# Altium footprint library Footprints.PcbLib: 320 footprints (part 16 of 20)
Each footprint in its own frame and in the unit in brackets; x right, y up, seen from the top. Pads: shape width x height; smd on the part's side, far side on the other; paste and mask are expansions set on the pad; w line width, h text height; cw(c..) or ccw(c..) is an arc to the next point about the centre after c.
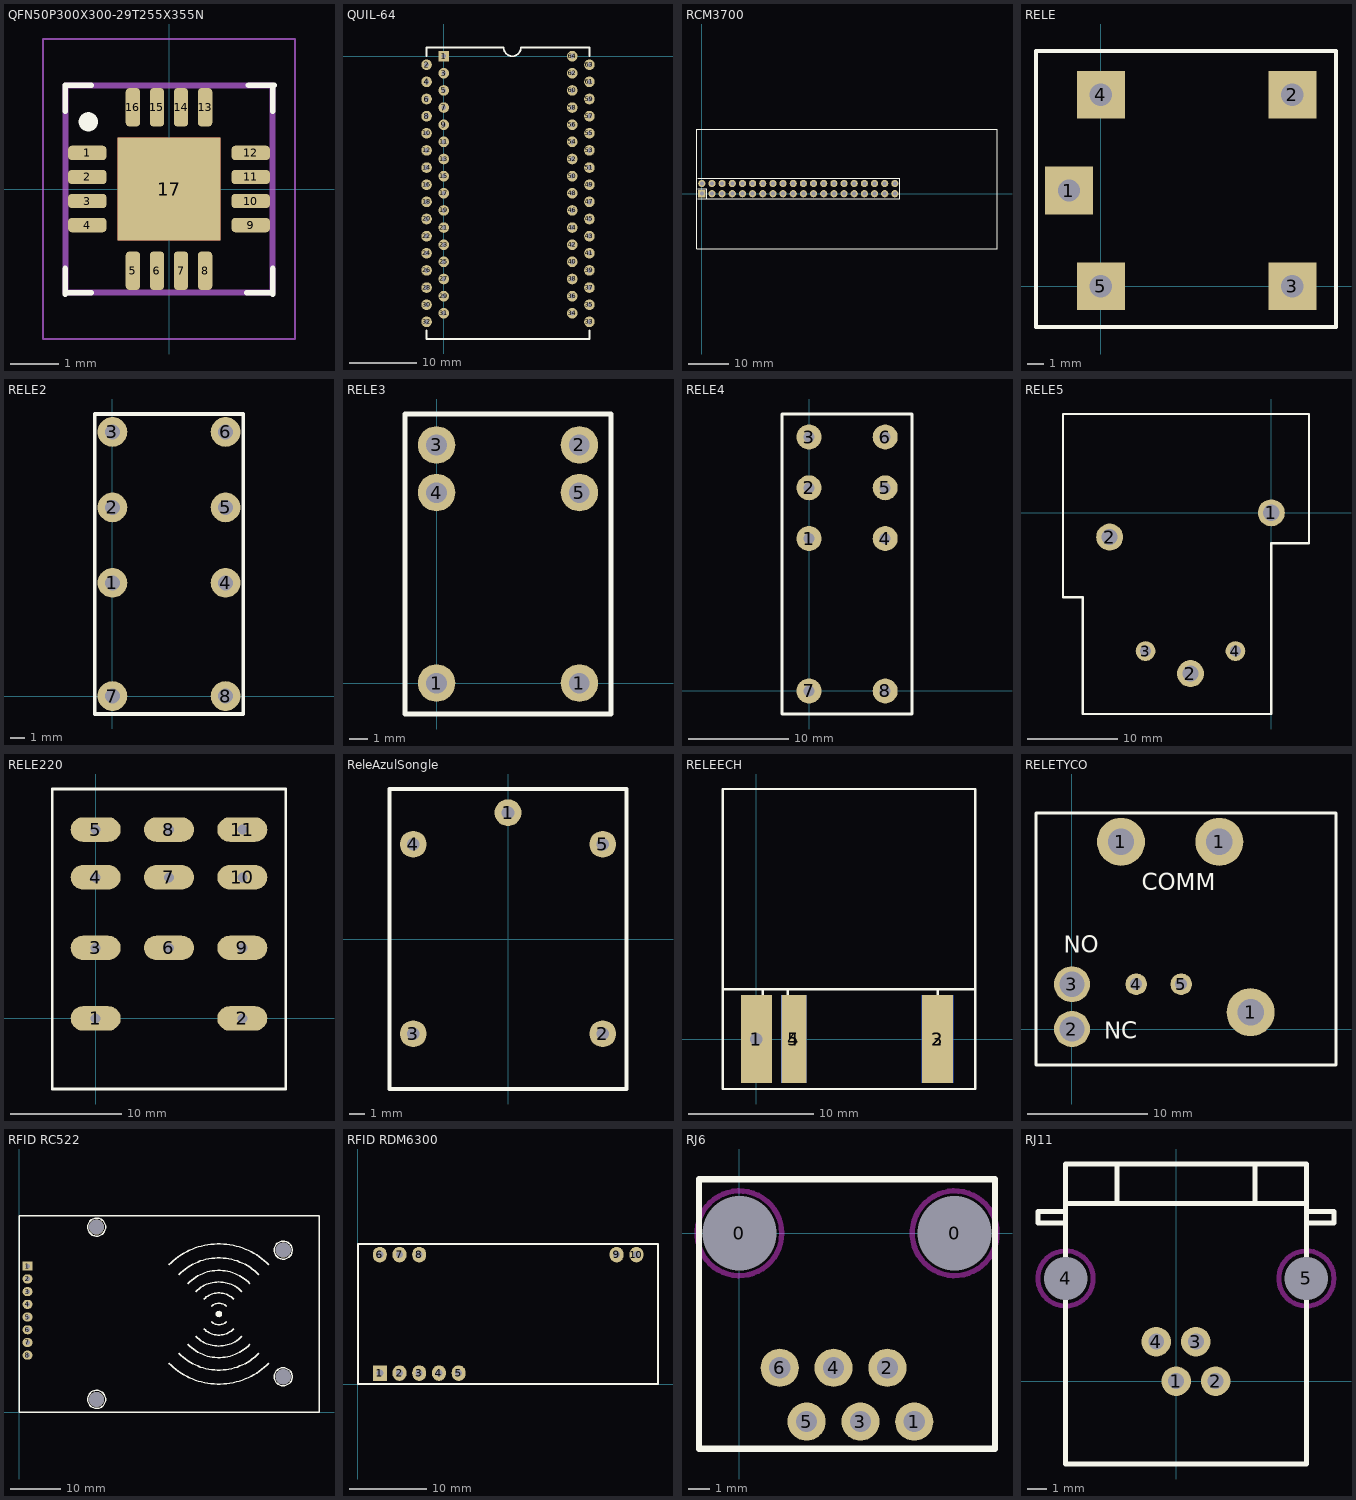
[diagram p15: the footprints below, top view; thin cyan lines are the x and y axes]

## QFN50P300X300-29T255X355N [mm] "Quad Flat No-Lead (QFN with Tab), 0.50 mm pitch;rect.,8 pin X 6 pin,5.00 mm L X 4.00 mm W X 0.80 mm H body"
height 0.8
pads (17):
  rrect52% 0.8x0.3 smd: 1(-1.7,0.75) 2(-1.7,0.25) 3(-1.7,-0.25) 4(-1.7,-0.75) 9(1.7,-0.75) 10(1.7,-0.25) 11(1.7,0.25) 12(1.7,0.75)
  rrect52% 0.3x0.8 smd: 5(-0.75,-1.7) 6(-0.25,-1.7) 7(0.25,-1.7) 8(0.75,-1.7) 13(0.75,1.7) 14(0.25,1.7) 15(-0.25,1.7) 16(-0.75,1.7)
  rect 2.14x2.14 smd paste-2.85 mask-2.85: 17(0,0)
Top Layer:
  region: 0,-1.07 -1.07,-1.07 -1.07,1.07 -0.925,1.07 1.07,1.07 1.07,-1.07
Top Overlay:
  circle w0.2: c-1.678,1.397 r0.1
  lines w0.12: -2.159,-2.191 -2.159,-1.651 ; -2.159,-2.159 -1.619,-2.159 ; -2.159,1.619 -2.159,2.159 -1.619,2.159 ; 1.619,-2.159 2.159,-2.159 ; 1.651,2.159 2.191,2.159 ; 2.159,-2.191 2.159,-1.651 ; 2.159,1.619 2.159,2.159
Top Solder:
  region: -1.07,-1.07 -1.07,1.07 1.07,-1.07 1.07,1.07
Mechanical 13:
  lines w0.12: -2.15,-2.15 2.15,-2.15 2.15,2.15 -2.15,2.15 -2.15,-2.15
Mechanical 15:
  circle w0.05: c0,0 r0.25
  lines w0.05: -0.35,0 0.35,0 ; 0,-0.35 0,0.35 ; -2.62,-3.12 2.62,-3.12 2.62,3.12 -2.62,3.12 -2.62,-3.12
3D body: height 0.8, standoff 0, extent -2.21,-2.21 2.21,2.21

## QUIL-64 [mil]
pads (64):
  rect 62x62 hole 28: 1(0,0)
  round 62 hole 28: 2(-100,-50) 3(0,-100) 4(-100,-150) 5(0,-200) 6(-100,-250) 7(0,-300) 8(-100,-350) 9(0,-400) 10(-100,-450) 11(0,-500) 12(-100,-550) 13(0,-600) 14(-100,-650) 15(0,-700) 16(-100,-750) 17(0,-800) 18(-100,-850) 19(0,-900) 20(-100,-950) 21(0,-1000) 22(-100,-1050) 23(0,-1100) 24(-100,-1150) 25(0,-1200) 26(-100,-1250) 27(0,-1300) 28(-100,-1350) 29(0,-1400) 30(-100,-1450) 31(0,-1500) 32(-100,-1550) 33(850,-1550) 34(750,-1500) 35(850,-1450) 36(750,-1400) 37(850,-1350) 38(750,-1300) 39(850,-1250) 40(750,-1200) 41(850,-1150) 42(750,-1100) 43(850,-1050) 44(750,-1000) 45(850,-950) 46(750,-900) 47(850,-850) 48(750,-800) 49(850,-750) 50(750,-700) 51(850,-650) 52(750,-600) 53(850,-550) 54(750,-500) 55(850,-450) 56(750,-400) 57(850,-350) 58(750,-300) 59(850,-250) 60(750,-200) 61(850,-150) 62(750,-100) 63(850,-50) 64(750,0)
Top Overlay:
  lines w10: 350,50 ccw(c400,50) 450,50
  lines w12: -100,-1600 -100,-1650 850,-1650 850,-1600 ; -100,0 -100,50 350,50 ; 450,50 850,50 850,0

## RCM3700 [mm]
pads (40):
  rect 1.8x1.8 hole 1: 1(0,0)
  round 1.8 hole 1: 2(0,2.54) 3(2.54,0) 4(2.54,2.54) 5(5.08,0) 6(5.08,2.54) 7(7.62,0) 8(7.62,2.54) 9(10.16,0) 10(10.16,2.54) 11(12.7,0) 12(12.7,2.54) 13(15.24,0) 14(15.24,2.54) 15(17.78,0) 16(17.78,2.54) 17(20.32,0) 18(20.32,2.54) 19(22.86,0) 20(22.86,2.54) 21(25.4,0) 22(25.4,2.54) 23(27.94,0) 24(27.94,2.54) 25(30.48,0) 26(30.48,2.54) 27(33.02,0) 28(33.02,2.54) 29(35.56,0) 30(35.56,2.54) 31(38.1,0) 32(38.1,2.54) 33(40.64,0) 34(40.64,2.54) 35(43.18,0) 36(43.18,2.54) 37(45.72,0) 38(45.72,2.54) 39(48.26,0) 40(48.26,2.54)
Top Overlay:
  lines w0.3: -1,-1.3 49.53,-1.27 49.53,3.81 -1,3.8 ; -1,1.2 1.2,1.2 1.2,-1.27 ; -1.2,-13.83 73.8,-13.83 73.8,16.17 -1.2,16.17 -1.2,-13.83

## RELE [mm]
pads (5):
  rect 3x3 hole 1.4: 1(-2,6) 2(12,12) 3(12,0) 4(0,12) 5(0,0)
Top Overlay:
  lines w0.254: -4.064,-2.54 14.732,-2.54 14.732,14.732 -4.064,14.732 -4.064,-2.032 -4.064,-2.54

## RELE2 [mm]
pads (8):
  round 2 hole 1: 1(0,7.62) 2(0,12.7) 3(0,17.78) 4(7.62,7.62) 5(7.62,12.7) 6(7.62,17.78) 7(0,0) 8(7.62,0)
Top Overlay:
  lines w0.254: -1.19,-1.21 -1.19,18.99 8.81,18.99 8.81,-1.21 -1.19,-1.21

## RELE3 [mm]
pads (6):
  round 2 hole 1.1: 1(0,0) 1(7.62,0) 2(7.62,12.7) 3(0,12.7) 4(0,10.16) 5(7.62,10.16)
Top Overlay:
  lines w0.254: -1.69,-1.65 -1.69,14.35 9.31,14.35 9.31,-1.65 -1.69,-1.65

## RELE4 [mm]
pads (8):
  round 2.5 hole 1.1: 1(0,15.24) 2(0,20.32) 3(0,25.4) 4(7.62,15.24) 5(7.62,20.32) 6(7.62,25.4) 7(0,0) 8(7.62,0)
Top Overlay:
  lines w0.254: -2.7,-2.3 10.3,-2.3 10.3,27.7 -2.7,27.7 -2.7,-2.3

## RELE5 [mm]
pads (5):
  round 3 hole 1.8: 1(0,0) 2(-18,-2.7) 2(-9,-17.9)
  round 2.2 hole 1.2: 3(-14,-15.4) 4(-4,-15.4)
Top Overlay:
  lines w0.254: -23.2,-9.4 -23.2,11 4.2,11 4.2,-3.4 0,-3.4 0,-22.4 -21,-22.4 -21,-9.4 -23.2,-9.4

## RELE220 [mm]
pads (11):
  oval 4.5x2.2 hole 0.9: 1(0,0) 2(13.2,0) 3(0,6.35) 4(0,12.7) 5(0,17) 6(6.6,6.35) 7(6.6,12.7) 8(6.6,17) 9(13.2,6.35) 10(13.2,12.7) 11(13.2,17)
Top Overlay:
  lines w0.254: -3.9,-6.35 17.1,-6.35 17.1,20.65 -3.9,20.65 -3.9,-6.35
Mechanical 1:
  lines w0.254: -1,0 1,0 ; -1,6.35 1,6.35 ; -1,12.7 1,12.7 ; -1,17 1,17 ; 5.6,6.35 7.6,6.35 ; 5.6,12.7 7.6,12.7 ; 5.6,17 7.6,17 ; 12.2,0 14.2,0 ; 12.2,6.35 14.2,6.35 ; 12.2,12.7 14.2,12.7 ; 12.2,17 14.2,17

## ReleAzulSongle [mm]
pads (5):
  round 1.7 hole 0.8: 1(0,8) 2(6,-6) 3(-6,-6) 4(-6,6) 5(6,6)
Top Overlay:
  lines w0.254: -7.5,-9.5 -7.5,9.5 7.5,9.5 7.5,-9.5 -7.5,-9.5

## RELEECH [mm]
pads (5):
  rect 2.5x7 hole 1: 1(0,0)
  rect 2.5x7 smd far side: 2(14.5,0)
  rect 2.5x7 smd: 3(14.5,0)
  rect 2x7 smd far side: 4(3,0)
  rect 2x7 smd: 5(3,0)
Top Overlay:
  lines w0.2: 0.5,0 0.5,4 ; 2.5,0 2.5,4 ; 14.5,0 14.5,4 ; -2.7,4 17.5,4 ; -2.7,4 -2.7,-4 17.5,-4 17.5,4 ; -2.7,4 -2.7,20 17.5,20 17.5,4

## RELETYCO [mm]
pads (7):
  round 4 hole 2.2: 1(4.08,15.6) 1(12.28,15.6) 1(14.88,1.4)
  round 3 hole 2.1: 2(0,0) 3(0,3.73)
  round 1.8 hole 1: 4(5.35,3.73) 5(9.1,3.73)
Top Overlay:
  lines w0.254: -3,-3 22,-3 22,18 -3,18 -3,-3
  text "COMM" at 5.81,11.55 h1.4
  text "NC" at 2.7,-0.8 h1.4
  text "NO" at -0.67,6.37 h1.4

## RFID RC522 [mm]
pads (12):
  rect 2x1.8 hole 0.9: 1(1.7,29.2)
  oval 2x1.8 hole 0.9: 2(1.7,26.66) 3(1.7,24.12) 4(1.7,21.58) 5(1.7,19.04) 6(1.7,16.5) 7(1.7,13.96) 8(1.7,11.42)
  round 3 hole 3: ""(15.5,2.6) ""(15.5,37) ""(52.76,7.12) ""(52.76,32.4)
Top Overlay:
  circle w0.254: c39.9,19.65 r0.3
  circle w0.254: c39.9,19.65 r0.5
  circle w0.254: c39.9,19.65 r0.1
  circle w0.254: c15.5,37 r1.8
  circle w0.254: c15.5,2.6 r1.8
  circle w0.254: c52.76,7.12 r1.8
  circle w0.254: c52.76,32.4 r1.8
  lines w0.254: 29.9,9.852 ccw(c39.9,19.65) 49.9,9.852 ; 29.9,29.448 cw(c39.9,19.65) 49.9,29.448 ; 31.9,11.812 ccw(c39.9,19.65) 47.9,11.812 ; 31.9,27.488 cw(c39.9,19.65) 47.9,27.488 ; 33.686,13.561 ccw(c39.9,19.65) 46.114,13.561 ; 33.686,25.739 cw(c39.9,19.65) 46.114,25.739 ; 35.329,15.171 ccw(c39.9,19.65) 44.471,15.171 ; 35.329,24.129 cw(c39.9,19.65) 44.471,24.129 ; 36.9,16.711 ccw(c39.9,19.65) 42.9,16.711 ; 36.9,22.589 cw(c39.9,19.65) 42.9,22.589 ; 38.364,18.145 ccw(c39.9,19.65) 41.436,18.145 ; 38.364,21.155 cw(c39.9,19.65) 41.436,21.155 ; 0,0 59.9,0 59.9,39.3 0,39.3 0,0
3D body "RFID MFRC522.step": height 16.15, standoff -3.2, extent 0,0 59.9,39.3

## RFID RDM6300 [mm]
pads (10):
  rect 1.8x2 hole 0.9: 1(2.85,1.45)
  oval 1.8x2 hole 0.9: 2(5.39,1.45) 3(7.93,1.45) 4(10.47,1.45) 5(13.01,1.45) 6(2.85,16.69) 7(5.39,16.69) 8(7.93,16.69) 9(33.33,16.69) 10(35.87,16.69)
Top Overlay:
  lines w0.254: 0.05,0.05 0.05,18.05 38.65,18.05 38.65,0.05 0.05,0.05
3D body "RFID RDM6300.step": height 6.12, standoff -6.69, extent 0.05,0.05 38.65,18.05

## RJ6 [mm]
pads (8):
  round 3 hole 3.5: 0(0,0) 0(10.16,0)
  round 1.8 hole 1: 1(8.255,-8.89) 2(6.985,-6.35) 3(5.715,-8.89) 4(4.445,-6.35) 5(3.175,-8.89) 6(1.905,-6.35)
Top Overlay:
  lines w0.305: -1.905,-10.16 -1.905,2.54 12.065,2.54 12.065,-10.16 -1.905,-10.16
Keep-Out Layer:
  circle w0.254: c10.16,0 r2
  circle w0.254: c0,0 r2

## RJ11 [mm]
pads (6):
  round 1.5 hole 0.8: 1(0,0) 2(2,0) 3(1,2) 4(-1.01,2)
  round 1.8 hole 2.2: 4(-5.6,5.2) 5(6.6,5.2)
Top Overlay:
  lines w0.254: -5.6,8 -7,8 -7,8.6 -5.6,8.6 ; -5.6,9 6.59,9 ; -2.99,9.06 -2.99,11 ; 4,9.03 4,11 ; 6.6,8 8,8 8,8.6 6.6,8.6 ; -5.6,-4.2 6.6,-4.2 6.6,11 -5.6,11 -5.6,-4.2
Keep-Out Layer:
  circle w0.254: c6.6,5.2 r1.4
  circle w0.254: c-5.6,5.2 r1.4